# Altium footprint library Footprint_Vlad.PcbLib: 392 footprints (part 19 of 25)
Each footprint in its own frame and in the unit in brackets; x right, y up, seen from the top. Pads: shape width x height; smd on the part's side, far side on the other; paste and mask are expansions set on the pad; w line width, h text height; cw(c..) or ccw(c..) is an arc to the next point about the centre after c.
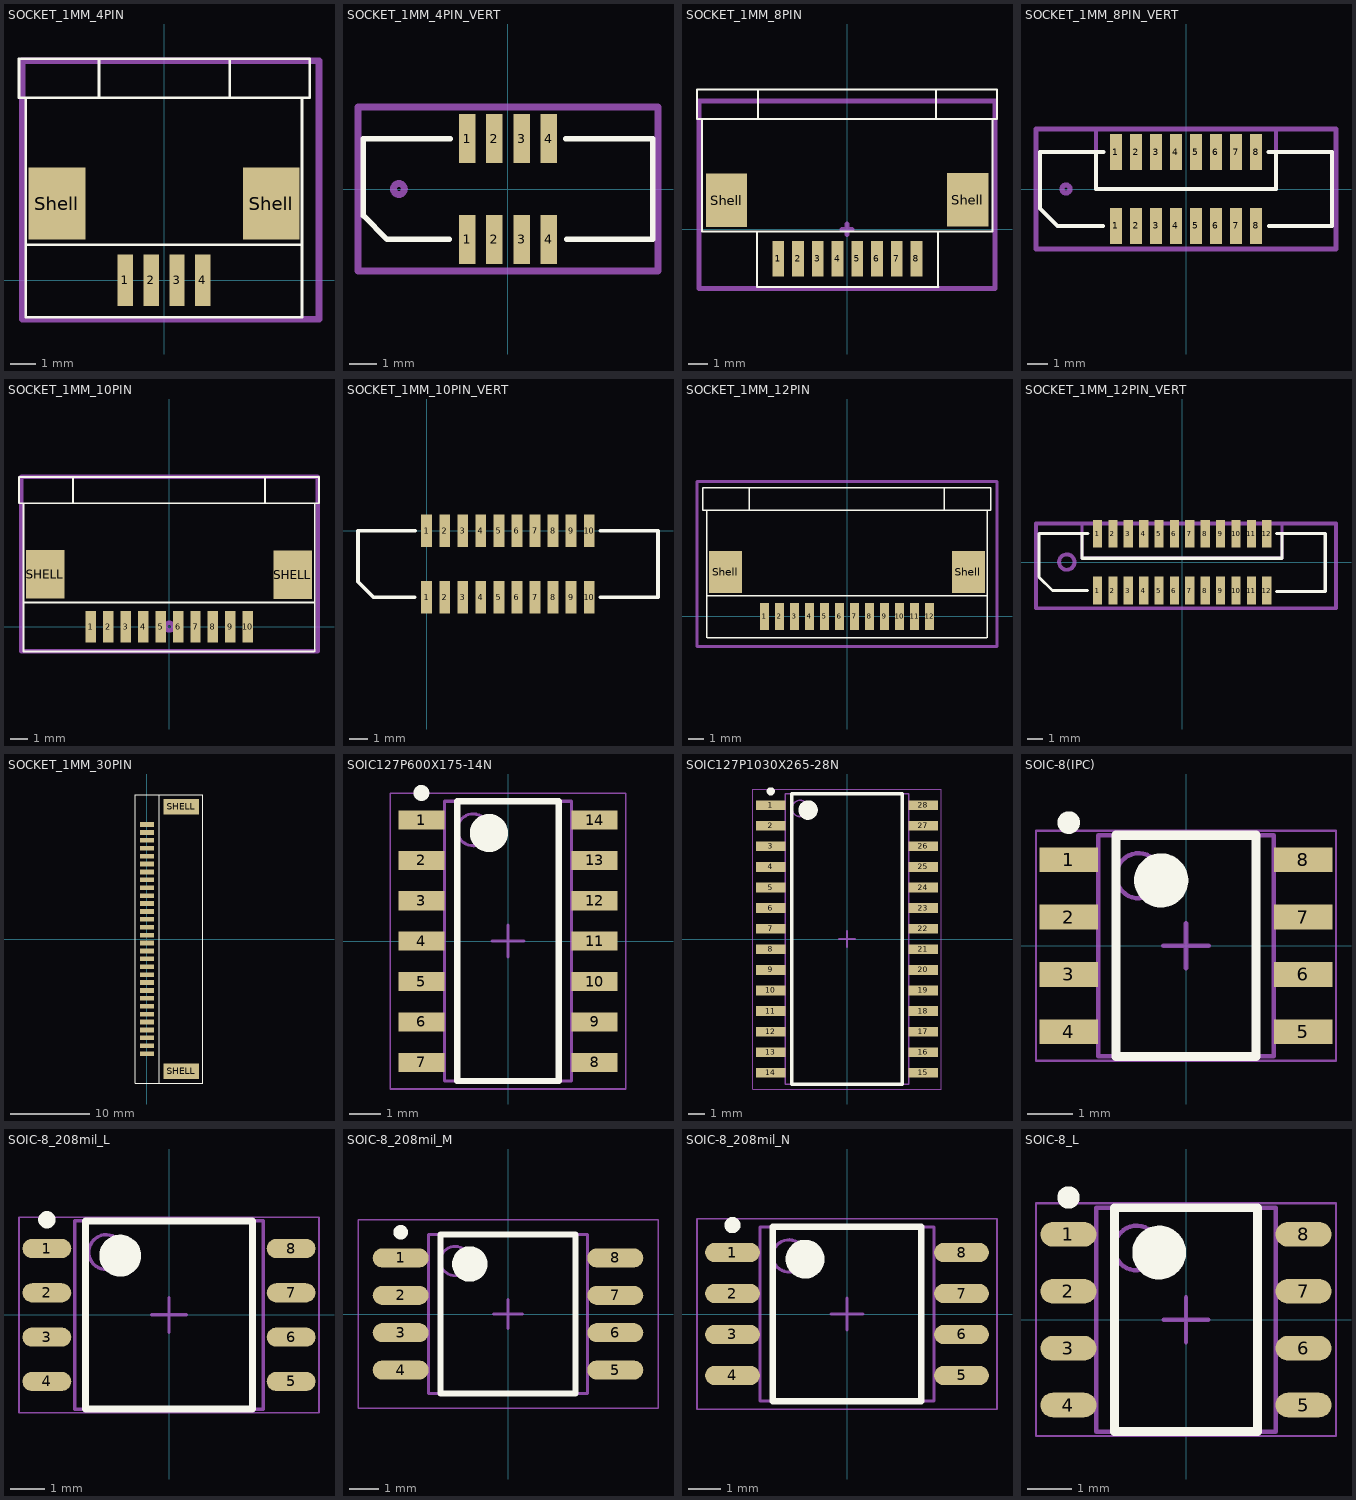
[diagram p18: the footprints below, top view; thin cyan lines are the x and y axes]

## SOCKET_1MM_4PIN [mm]
pads (6):
  rect 0.6x2 smd: 1(-1.5,0) 2(-0.5,0) 3(0.5,0) 4(1.5,0)
  rect 2.2x2.8 smd: Shell(-4.15,2.975) Shell(4.15,2.975)
Top Overlay:
  lines w0.1: -5.36,-1.42 -5.36,7.08 ; -5.36,1.38 5.34,1.38 ; -5.32,-1.42 5.34,-1.42 5.34,7.08 ; -2.52,7.08 -2.52,8.58 ; 2.54,7.08 2.54,8.58 ; -5.62,7.08 -5.62,8.58 5.64,8.58 5.64,7.08 -5.62,7.08
Mechanical 15:
  lines w0.254: -5.5,-1.5 6,-1.5 6,8.5 -5.5,8.5 -5.5,-1.5
  text ".Designator" at -5,9 h1.52
3D body "487952-4.stp": height 2.51, standoff -0.02, extent -5.96,0 5.96,6.553

## SOCKET_1MM_4PIN_VERT [mm]
pads (8):
  rect 0.6x1.8 smd: 1(-1.5,-1.85) 1(-1.5,1.85) 2(-0.5,-1.85) 2(-0.5,1.85) 3(0.5,-1.85) 3(0.5,1.85) 4(1.5,-1.85) 4(1.5,1.85)
Top Overlay:
  lines w0.2: -2.15,-1.85 -4.43,-1.85 -5.3,-0.98 -5.3,1.85 -2.125,1.85 ; 2.125,1.85 5.3,1.85 5.3,-1.85 2.15,-1.85
Mechanical 15:
  circle w0.254: c-4,0 r0.2
  lines w0.254: -5.5,-3 5.5,-3 5.5,3 -5.5,3 -5.5,-3
  text ".Designator" at -5,3.3 h1.52

## SOCKET_1MM_8PIN [mm]
pads (10):
  rect 0.6x1.8 smd: 1(-3.487,-1.5) 2(-2.487,-1.5) 3(-1.487,-1.5) 4(-0.487,-1.5) 5(0.513,-1.5) 6(1.513,-1.5) 7(2.513,-1.5) 8(3.513,-1.5)
  rect 2.1x2.7 smd paste+0 mask+0.1: Shell(-6.112,1.475) Shell(6.113,1.5)
Top Overlay:
  lines w0.1: -7.347,5.58 -7.347,-0.12 7.353,-0.12 7.353,5.58 ; -4.567,-2.92 4.618,-2.92 ; -4.562,-2.92 -4.562,-0.12 ; -4.507,5.58 -4.507,7.08 ; 4.493,5.58 4.493,7.08 ; 4.613,-2.925 4.613,-0.125 ; -7.607,5.58 7.593,5.58 7.593,7.08 -7.607,7.08 -7.607,5.58
Mechanical 15:
  lines w0.254: -0.254,0 0.254,0 ; 0,-0.254 0,0.254 ; -7.5,-3 -7.5,6.5 7.5,6.5 7.5,-3 -7.5,-3
  text ".Designator" at -6.5,7.1 h1.52
3D body "5579.stp": height 3, standoff 0, extent -7.488,-2.2 7.513,6.5

## SOCKET_1MM_8PIN_VERT [mm]
pads (16):
  rect 0.6x1.8 smd: 1(-3.5,-1.85) 1(-3.5,1.85) 2(-2.5,-1.85) 2(-2.5,1.85) 3(-1.5,-1.85) 3(-1.5,1.85) 4(-0.5,-1.85) 4(-0.5,1.85) 5(0.5,-1.85) 5(0.5,1.85) 6(1.5,-1.85) 6(1.5,1.85) 7(2.5,-1.85) 7(2.5,1.85) 8(3.5,-1.85) 8(3.5,1.85)
Top Overlay:
  lines w0.2: -4.5,1.85 -4.5,0.5 -4.5,0 4.5,0 4.5,0.5 ; -4.15,-1.85 -6.43,-1.85 -7.3,-0.98 -7.3,1.85 -4.125,1.85 ; 4.125,1.85 7.3,1.85 7.3,-1.85 4.15,-1.85 ; 4.5,0.5 4.5,1.85 4.5,0.5
Mechanical 15:
  circle w0.254: c-6,0 r0.2
  lines w0.2: -4.5,3 -4.5,0 4.5,0 4.5,3
  lines w0.254: -7.5,-3 -7.5,3 7.5,3 7.5,-3 -7.5,-3
  text ".Designator" at -7,3.3 h1.52

## SOCKET_1MM_10PIN [mm]
pads (12):
  rect 0.6x1.8 smd: 1(-4.5,0) 2(-3.5,0) 3(-2.5,0) 4(-1.5,0) 5(-0.5,0) 6(0.5,0) 7(1.5,0) 8(2.5,0) 9(3.5,0) 10(4.5,0)
  rect 2.2x2.8 smd: SHELL(-7.125,3) SHELL(7.075,2.975)
Top Overlay:
  lines w0.1: -8.36,-1.42 -8.36,7.08 ; -8.36,1.38 8.28,1.38 ; -8.32,-1.42 8.28,-1.42 ; -8.26,7.08 8.24,7.08 ; -8.22,7.08 -8.62,7.08 -8.62,8.58 8.58,8.58 8.58,7.08 8.28,7.08 ; -5.52,7.08 -5.52,8.58 ; 5.48,7.08 5.48,8.58 ; 8.34,-1.42 8.34,7.08
Mechanical 15:
  circle w0.254: c0,0 r0.224
  lines w0.254: -8.5,-1.4 8.5,-1.4 8.5,8.6 -8.5,8.6 -8.5,-1.4
  text ".Designator" at -7.5,9 h1.52
3D body "1-487951-0.stp": height 2.7, standoff 0.02, extent -8.96,0.4 8.96,6.953

## SOCKET_1MM_10PIN_VERT [mm]
pads (20):
  rect 0.6x1.8 smd: 1(0,-3.7) 1(0,0) 2(1,-3.7) 2(1,0) 3(2,-3.7) 3(2,0) 4(3,-3.7) 4(3,0) 5(4,-3.7) 5(4,0) 6(5,-3.7) 6(5,0) 7(6,-3.7) 7(6,0) 8(7,-3.7) 8(7,0) 9(8,-3.7) 9(8,0) 10(9,-3.7) 10(9,0)
Top Overlay:
  lines w0.2: -0.65,-3.7 -2.93,-3.7 -3.8,-2.83 -3.8,0 -0.625,0 ; 9.625,-3.7 12.81,-3.7 12.81,0 9.625,0

## SOCKET_1MM_12PIN [mm]
pads (14):
  rect 0.6x1.8 smd: 1(-5.5,0) 2(-4.5,0) 3(-3.5,0) 4(-2.5,0) 5(-1.5,0) 6(-0.5,0) 7(0.5,0) 8(1.5,0) 9(2.5,0) 10(3.5,0) 11(4.5,0) 12(5.5,0)
  rect 2.2x2.8 smd: Shell(-8.1,2.975) Shell(8.1,2.975)
Top Overlay:
  lines w0.1: -9.36,-1.42 -9.36,7.08 ; -9.36,1.38 9.3,1.38 ; -9.32,-1.42 9.3,-1.42 ; -9.26,7.08 9.28,7.08 9.58,7.08 9.58,8.58 -9.62,8.58 -9.62,7.08 -9.22,7.08 ; -6.52,7.08 -6.52,8.58 ; 6.48,7.08 6.48,8.58 ; 9.34,-1.42 9.34,7.08
Mechanical 15:
  lines w0.2: -10,-2 10,-2 10,9 -10,9 -10,-2
  text ".Designator" at -10,9.5 h1.52

## SOCKET_1MM_12PIN_VERT [mm]
pads (24):
  rect 0.6x1.8 smd: 1(-5.5,-1.85) 1(-5.5,1.85) 2(-4.5,-1.85) 2(-4.5,1.85) 3(-3.5,-1.85) 3(-3.5,1.85) 4(-2.5,-1.85) 4(-2.5,1.85) 5(-1.5,-1.85) 5(-1.5,1.85) 6(-0.5,-1.85) 6(-0.5,1.85) 7(0.5,-1.85) 7(0.5,1.85) 8(1.5,-1.85) 8(1.5,1.85) 9(2.5,-1.85) 9(2.5,1.85) 10(3.5,-1.85) 10(3.5,1.85) 11(4.5,-1.85) 11(4.5,1.85) 12(5.5,-1.85) 12(5.5,1.85)
Top Overlay:
  lines w0.2: -6.5,1.85 -6.5,0.5 -6.5,0.25 6.5,0.25 6.5,0.5 6.5,1.8 ; -6.15,-1.85 -8.43,-1.85 -9.3,-0.98 -9.3,1.85 -6.125,1.85 ; 6.125,-1.9 9.3,-1.9 9.3,1.85 6.125,1.85
Mechanical 15:
  circle w0.254: c-7.5,0 r0.5
  lines w0.2: -6.5,2.5 -6.5,0.25 6.5,0.25 6.5,2.5
  lines w0.254: -9.5,-3 -9.5,2.5 10,2.5 10,-3 -9.5,-3
  text ".Designator" at -6.5,3 h1.52

## SOCKET_1MM_30PIN [mm]
pads (32):
  rect 1.8x0.6 smd: 1(0,14.5) 2(0,13.5) 3(0,12.5) 4(0,11.5) 5(0,10.5) 6(0,9.5) 7(0,8.5) 8(0,7.5) 9(0,6.5) 10(0,5.5) 11(0,4.5) 12(0,3.5) 13(0,2.5) 14(0,1.5) 15(0,0.5) 16(0,-0.5) 17(0,-1.5) 18(0,-2.5) 19(0,-3.5) 20(0,-4.5) 21(0,-5.5) 22(0,-6.5) 23(0,-7.5) 24(0,-8.5) 25(0,-9.5) 26(0,-10.5) 27(0,-11.5) 28(0,-12.5) 29(0,-13.5) 30(0,-14.5)
  rect 4.5x2 smd: SHELL(4.325,-16.725) SHELL(4.325,16.75)
Top Overlay:
  lines w0.1: 1.54,-18.24 1.54,18.26 ; -1.46,-18.24 -1.46,18.26 7.04,18.26 7.04,-18.24 -1.46,-18.24
3D body "3-487951-0.stp": height 2.6, standoff -0.08, extent 0.122,-18.935 6.675,18.985

## SOIC127P600X175-14N [mm] "SOIC, 14-Leads, Body 8,65x3,90mm, Pitch 1,27mm, IPC Medium Density"
height 1.75
pads (14):
  rect 1.45x0.6 smd: 1(-2.725,3.81) 2(-2.725,2.54) 3(-2.725,1.27) 4(-2.725,0) 5(-2.725,-1.27) 6(-2.725,-2.54) 7(-2.725,-3.81) 8(2.725,-3.81) 9(2.725,-2.54) 10(2.725,-1.27) 11(2.725,0) 12(2.725,1.27) 13(2.725,2.54) 14(2.725,3.81)
Top Overlay:
  circle w0.6: c-0.6,3.4 r0.3
  circle w0.25: c-2.725,4.66 r0.125
  lines w0.2: -1.6,-4.4 1.6,-4.4 1.6,4.4 -1.6,4.4 -1.6,-4.4
Mechanical 15:
  circle w0.1: c-1.1,3.5 r0.5
  lines w0.05: -3.7,-4.65 3.7,-4.65 3.7,4.65 -3.7,4.65 -3.7,-4.65
  lines w0.1: -0.5,0 0.5,0 ; 0,-0.5 0,0.5 ; -2,-4.4 2,-4.4 2,4.4 -2,4.4 -2,-4.4
  text ".Designator" at -2.35,5.05 h1.52
3D body "SOIC127P600X175-14N.step": height 1.75, standoff 0, extent -3,-4.4 3,4.4

## SOIC127P1030X265-28N [mm] "SOIC, 28-Leads, Body 17,90x7,50mm, Pitch 1,27mm, IPC Medium Density"
height 2.65
pads (28):
  rect 1.8x0.6 smd: 1(-4.7,8.255) 2(-4.7,6.985) 3(-4.7,5.715) 4(-4.7,4.445) 5(-4.7,3.175) 6(-4.7,1.905) 7(-4.7,0.635) 8(-4.7,-0.635) 9(-4.7,-1.905) 10(-4.7,-3.175) 11(-4.7,-4.445) 12(-4.7,-5.715) 13(-4.7,-6.985) 14(-4.7,-8.255) 15(4.7,-8.255) 16(4.7,-6.985) 17(4.7,-5.715) 18(4.7,-4.445) 19(4.7,-3.175) 20(4.7,-1.905) 21(4.7,-0.635) 22(4.7,0.635) 23(4.7,1.905) 24(4.7,3.175) 25(4.7,4.445) 26(4.7,5.715) 27(4.7,6.985) 28(4.7,8.255)
Top Overlay:
  circle w0.6: c-2.4,7.95 r0.3
  circle w0.25: c-4.7,9.105 r0.125
  lines w0.2: -3.4,-8.95 3.4,-8.95 3.4,8.95 -3.4,8.95 -3.4,-8.95
Assembly Top:
  circle w0.1: c-2.9,8.05 r0.5
  lines w0.1: -3.8,-8.95 3.8,-8.95 3.8,8.95 -3.8,8.95 -3.8,-8.95
Courtyard Top:
  lines w0.05: -5.825,-9.25 5.825,-9.25 5.825,9.25 -5.825,9.25 -5.825,-9.25
  lines w0.1: -0.5,0 0.5,0 ; 0,-0.5 0,0.5
3D body "SOIC127P1030X265-28N.step": height 2.65, standoff 0, extent -5.15,-8.95 5.15,8.95

## SOIC-8(IPC) [mm] "SOIC, 8-Leads, Body 4.90x3.90mm, Pitch 1.27mm, IPC High Density"
height 1.75
pads (8):
  rect 1.3x0.55 smd: 1(-2.6,1.905) 2(-2.6,0.635) 3(-2.6,-0.635) 4(-2.6,-1.905) 5(2.6,-1.905) 6(2.6,-0.635) 7(2.6,0.635) 8(2.6,1.905)
Top Overlay:
  circle w0.6: c-0.55,1.45 r0.3
  circle w0.25: c-2.6,2.73 r0.125
  lines w0.2: -1.55,-2.45 1.55,-2.45 1.55,2.45 -1.55,2.45 -1.55,-2.45
Mechanical 13:
  circle w0.1: c-1.05,1.55 r0.5
  lines w0.1: -1.95,-2.45 1.95,-2.45 1.95,2.45 -1.95,2.45 -1.95,-2.45
Mechanical 15:
  circle w0.254: c-2.6,1.9 r0.1
  lines w0.05: -3.325,-2.55 3.325,-2.55 3.325,2.55 -3.325,2.55 -3.325,-2.55
  lines w0.1: -0.5,0 0.5,0 ; 0,-0.5 0,0.5
  text ".Designator" at -2,3 h1.52
3D body "SOIC127P600X175-8L.step": height 1.75, standoff 0, extent -3,-2.45 3,2.45

## SOIC-8_208mil_L [mm]
height 2.16
pads (8):
  oval 1.4x0.55 smd: 1(-3.5,1.905) 2(-3.5,0.635) 3(-3.5,-0.635) 4(-3.5,-1.905) 5(3.5,-1.905) 6(3.5,-0.635) 7(3.5,0.635) 8(3.5,1.905)
Top Overlay:
  circle w0.6: c-1.4,1.7 r0.3
  circle w0.25: c-3.5,2.73 r0.125
  lines w0.2: -2.4,-2.7 2.4,-2.7 2.4,2.7 -2.4,2.7 -2.4,-2.7
Assembly Top:
  circle w0.1: c-1.8,1.8 r0.5
  lines w0.1: -2.7,-2.7 2.7,-2.7 2.7,2.7 -2.7,2.7 -2.7,-2.7
Courtyard Top:
  lines w0.05: -4.3,-2.8 4.3,-2.8 4.3,2.8 -4.3,2.8 -4.3,-2.8
  lines w0.1: -0.5,0 0.5,0 ; 0,-0.5 0,0.5
3D body "SOIC-8_208mil_L.step": height 2.16, standoff 0, extent -3.95,-2.7 3.95,2.7

## SOIC-8_208mil_M [mm]
height 2.16
pads (8):
  oval 1.9x0.65 smd: 1(-3.65,1.905) 2(-3.65,0.635) 3(-3.65,-0.635) 4(-3.65,-1.905) 5(3.65,-1.905) 6(3.65,-0.635) 7(3.65,0.635) 8(3.65,1.905)
Top Overlay:
  circle w0.25: c-3.65,2.78 r0.125
  circle w0.6: c-1.3,1.7 r0.3
  lines w0.2: -2.3,-2.7 -2.3,2.7 2.3,2.7 2.3,-2.7 -2.3,-2.7
Assembly Top:
  circle w0.1: c-1.8,1.8 r0.5
  lines w0.1: -2.7,-2.7 -2.7,2.7 2.7,2.7 2.7,-2.7 -2.7,-2.7
Courtyard Top:
  lines w0.05: -5.1,-3.2 -5.1,3.2 5.1,3.2 5.1,-3.2 -5.1,-3.2
  lines w0.1: -0.5,0 0.5,0 ; 0,-0.5 0,0.5
3D body "SOIC-8_208mil_M.step": height 2.16, standoff 0, extent -3.95,-2.7 3.95,2.7

## SOIC-8_208mil_N [mm] "8 Pin SOIC 208-mil Normal"
height 2.16
pads (8):
  oval 1.7x0.6 smd: 1(-3.55,1.905) 2(-3.55,0.635) 3(-3.55,-0.635) 4(-3.55,-1.905) 5(3.55,-1.905) 6(3.55,-0.635) 7(3.55,0.635) 8(3.55,1.905)
Top Overlay:
  circle w0.25: c-3.55,2.755 r0.125
  circle w0.6: c-1.3,1.7 r0.3
  lines w0.2: -2.3,-2.7 -2.3,2.7 2.3,2.7 2.3,-2.7 -2.3,-2.7
Assembly Top:
  circle w0.1: c-1.8,1.8 r0.5
  lines w0.1: -2.7,-2.7 -2.7,2.7 2.7,2.7 2.7,-2.7 -2.7,-2.7
Courtyard Top:
  lines w0.05: -4.65,-2.95 -4.65,2.95 4.65,2.95 4.65,-2.95 -4.65,-2.95
  lines w0.1: -0.5,0 0.5,0 ; 0,-0.5 0,0.5
3D body "SO-8_N.step": height 2.16, standoff 0, extent -3.95,-2.7 3.95,2.7

## SOIC-8_L [mm] "SOIC, 8-Leads, Body 4,90x3,90mm, Pitch 1,27mm, IPC High Density"
height 1.7
pads (8):
  oval 1.25x0.55 smd: 1(-2.625,1.905) 2(-2.625,0.635) 3(-2.625,-0.635) 4(-2.625,-1.905) 5(2.625,-1.905) 6(2.625,-0.635) 7(2.625,0.635) 8(2.625,1.905)
Top Overlay:
  circle w0.6: c-0.6,1.5 r0.3
  circle w0.25: c-2.625,2.73 r0.125
  lines w0.2: -1.6,-2.5 1.6,-2.5 1.6,2.5 -1.6,2.5 -1.6,-2.5
Assembly Top:
  circle w0.1: c-1.1,1.6 r0.5
  lines w0.1: -2,-2.5 2,-2.5 2,2.5 -2,2.5 -2,-2.5
Courtyard Top:
  lines w0.05: -3.35,-2.6 3.35,-2.6 3.35,2.6 -3.35,2.6 -3.35,-2.6
  lines w0.1: -0.5,0 0.5,0 ; 0,-0.5 0,0.5
3D body "SOIC-8_L.step": height 1.7, standoff 0, extent -3,-2.5 3,2.5